# Altium schematic symbol library Schlib.SchLib: 5 symbols
Pins are listed as number, name and electrical type; pins without a type are passive.

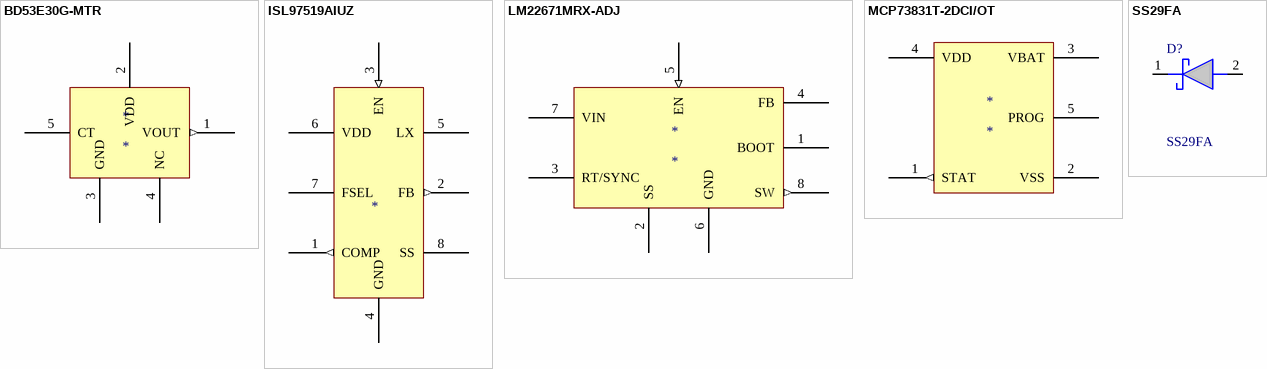
[diagram p0: symbols BD53E30G-MTR to SS29FA]

## BD53E30G-MTR
designator *
footprint BD53E30G-MTR (SOT23, 5-Leads, Body 2,90x2,80mm, Pitch 0,95mm, IPC Low Density)
pins: 1 VOUT (out) "Reset Output", 2 VDD (power) "Power Supply Voltage", 3 GND (power) "Ground", 4 NC "Unconnected Terminal", 5 CT "Capacitor connection terminal for"

## ISL97519AIUZ
designator *
footprint ISL97519AIUZ (TSOP, 8-Leads, Body 3,00x3,00mm, Pitch 0,65mm, IPC Low Density)
pins: 1 COMP (out) "Compensation pin", 2 FB (out) "Voltage feedback pin", 3 EN (in) "Shutdown control pin", 4 GND (power) "Analog and power ground", 5 LX "Power switch pin", 6 VDD (power) "Analog power supply input pin", 7 FSEL "Frequency select pin", 8 SS "Soft-start control pin."

## LM22671MRX-ADJ
designator *
footprint LM22671MRX-ADJ/NOPB (SOIC, 8-Leads, Body 4,90x3,90mm, Pitch 1,27mm, IPC Low Density)
pins: 1 BOOT "Bootstrap input", 2 SS "Soft-start pin", 3 RT/SYNC "Oscillator frequency adjust pin or frequency synchronization", 4 FB "Feedback pin", 5 EN (in) "Precision enable pin", 6 GND (power) "System ground", 7 VIN (power) "Source input voltage", 8 SW (out) "Switch pin"

## MCP73831T-2DCI/OT
designator *
footprint MCP73831T-2DCI/OT (SOT23, 5-Leads, Body 2,90x2,80mm, Pitch 0,95mm, IPC Low Density)
pins: 1 STAT (out) "Charge Status Output", 2 VSS "Battery Management 0V Reference", 3 VBAT "Battery Charge Control Output", 4 VDD (power) "Battery Management Input Supply", 5 PROG "Current Regulation Set and Charge Control Enable"

## SS29FA
designator D?
Schottky Diodes & Rectifiers 90V 2A Schottky B arrier Rectifier; Manufacturer_Name: onsemi; Geometry.Height: 1.43mm; Mouser Part Number: 512-SS29FA; Mouser Price/Stock: https://www.mouser.co.uk/ProductDetail/ON-Semiconductor-Fairchild/SS29FA?qs=R26iFe%2FkX%2FICExnaddSDew%3D%3D; Manufacturer_Part_Number: SS29FA; Datasheet Link: http://www.onsemi.com/pub/Collateral/SS29FA-D.pdf
footprint SS29FA (SODFL, 2-Leads, Body 1,80x3,60mm, IPC Low Density)
pins: 1 K, 2 A